# EAGLE library part STM32F103-BLUEPILL (library moto-edge-hil)
STM32F103-BLUEPILL STM32F103C8T6 Blue Pill. Satirlar 15.24 mm, USB ustte. Kart: 22.8 x 53.0 mm - Guven: H STEP: GrabCAD 'STM32 Blue Pill'
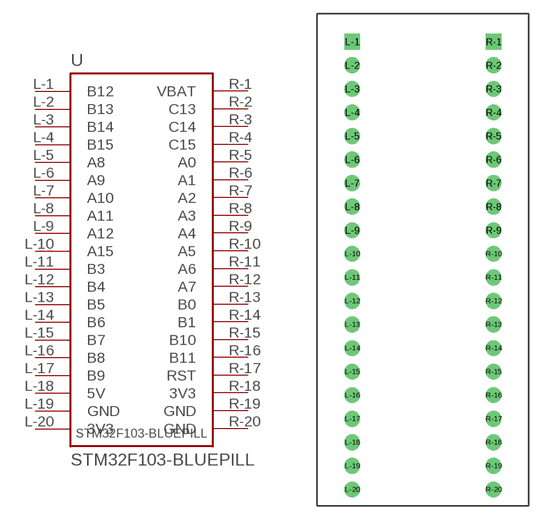
[diagram p3: symbol with the pads of STM32F103-BLUEPILL; footprint STM32F103-BLUEPILL]

Designator prefix U

## STM32F103-BLUEPILL (BOARD_SIZE: 22.8x53.0mm; CONFIDENCE: H)  [STM32F103-BLUEPILL]
L-1  B12  pas
L-2  B13  pas
L-3  B14  pas
L-4  B15  pas
L-5  A8  pas
L-6  A9  pas
L-7  A10  pas
L-8  A11  pas
L-9  A12  pas
L-10  A15  pas
L-11  B3  pas
L-12  B4  pas
L-13  B5  pas
L-14  B6  pas
L-15  B7  pas
L-16  B8  pas
L-17  B9  pas
L-18  5V  pas
L-19  GND  pas
L-20  3V3  pas
R-1  VBAT  pas
R-2  C13  pas
R-3  C14  pas
R-4  C15  pas
R-5  A0  pas
R-6  A1  pas
R-7  A2  pas
R-8  A3  pas
R-9  A4  pas
R-10  A5  pas
R-11  A6  pas
R-12  A7  pas
R-13  B0  pas
R-14  B1  pas
R-15  B10  pas
R-16  B11  pas
R-17  RST  pas
R-18  3V3  pas
R-19  GND  pas
R-20  GND  pas

## Footprint STM32F103-BLUEPILL (pad centres in mm)
STM32F103C8T6 Blue Pill. Satirlar 15.24 mm, USB ustte. | Kart: 22.8 x 53.0 mm | Guven: H
drill 1 pad 1.7 square: L-1 -7.62,23.5; R-1 7.62,23.5
drill 1 pad 1.7 round: L-2 -7.62,20.96; L-3 -7.62,18.42; L-4 -7.62,15.88; L-5 -7.62,13.34; L-6 -7.62,10.8; L-7 -7.62,8.26; L-8 -7.62,5.72; L-9 -7.62,3.18; L-10 -7.62,0.64; L-11 -7.62,-1.9; L-12 -7.62,-4.44; L-13 -7.62,-6.98; L-14 -7.62,-9.52; L-15 -7.62,-12.06; L-16 -7.62,-14.6; L-17 -7.62,-17.14; L-18 -7.62,-19.68; L-19 -7.62,-22.22; L-20 -7.62,-24.76; R-2 7.62,20.96; R-3 7.62,18.42; R-4 7.62,15.88; R-5 7.62,13.34; R-6 7.62,10.8; R-7 7.62,8.26; R-8 7.62,5.72; R-9 7.62,3.18; R-10 7.62,0.64; R-11 7.62,-1.9; R-12 7.62,-4.44; R-13 7.62,-6.98; R-14 7.62,-9.52; R-15 7.62,-12.06; R-16 7.62,-14.6; R-17 7.62,-17.14; R-18 7.62,-19.68; R-19 7.62,-22.22; R-20 7.62,-24.76